# Altium schematic symbol library Grant_..SchLib: 158 symbols (part 4 of 4)
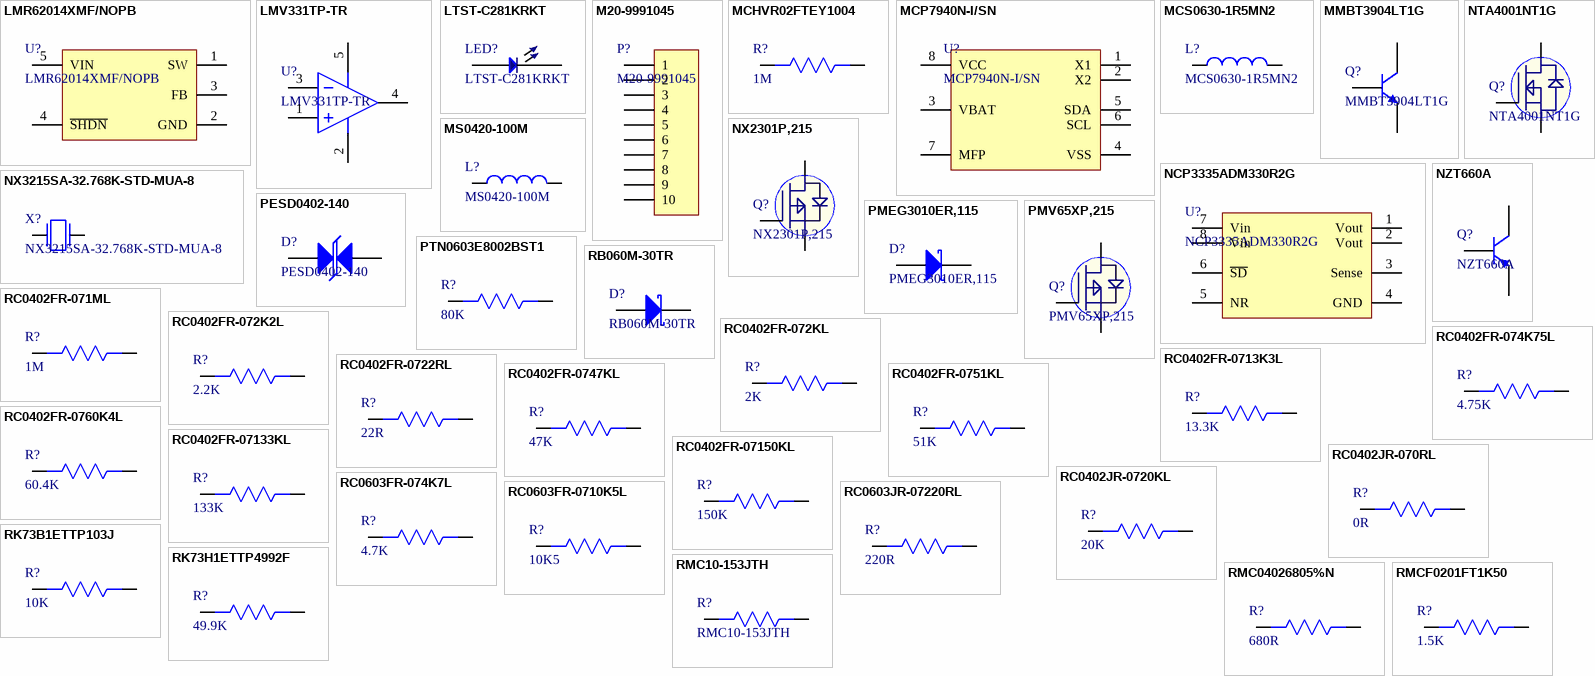
[diagram p7: symbols LMR62014XMF/NOPB to RMCF0201FT1K50]

## RC0603JR-07220RL
designator R?, comment 220R
RES SMD 0603 220 Ohm 5% 1/10W +/-100ppm/ßC Molded SMD Paper T/R; Manufacturer: Yageo; Manufacturer Part Number: RC0603JR-07220RL; Temperature Coefficient: 100ppm/°C; Voltage Rating: 50V; Power Rating: 100mW; Working Voltage: 75V; Supplier 1: Digi-Key; RoHS: Yes; Category: Chip SMD Resistors; Stock 1: 724747; Pricing 1: 1=0.10000, 10=0.02000, 100=0.00800, 1000=0.00360, 2500=0.00312 (USD); Case/Package: 0603; Number of Pins: 2; Case Code (Imperial): 0603; Case Code (Metric): 1608; Min Operating Temperature: -55°C; Max Operating Temperature: 155°C; Resistance: 220R; Tolerance: 5%; Resistor Type: Thick Film; Packaging: Tape and Reel; Voltage Rating (DC): 50V; Resistance Tolerance: 5%; Termination: SMD/SMT; Number of Terminations: 2; Features: Moisture Resistant; Series: RC; Max Power Dissipation: 100mW; Construction: Rectangular; Length: 1.6mm; Width: 0.8mm; Depth: 0.8mm; REACH SVHC: No SVHC; Lead Free: Lead Free; RoHS Compliant: Yes; Military Standard: Not; ComponentLink1URL: https://datasheet.ciiva.com/46394/443971-46394998.pdf?src-supplier=Element14; ComponentLink1Description: https://datasheet.ciiva.com/46394/443971-46394998.pdf?src-supplier=Element14; Supplier Part Number 1: 311-220GRCT-ND
footprint Res0603
pins: 1, 2

## RK73B1ETTP103J
designator R?, comment 10K
RES 10K OHM 5% 1/10W 0402; Manufacturer: KOA Speer; Manufacturer Part Number: RK73B1ETTP103J; Resistance: 10kR; Power Rating: 63mW; Voltage Rating: 50V; Temperature Coefficient: 200ppm/°C; Supplier 1: Digi-Key; Stock 1: 2917894; Pricing 1: 1=0.1, 10=0.016, 100=0.0065, 1000=0.00292, 2500=0.00253, 5000=0.00209 (USD); Mount: Surface Mount; Case/Package: 0402; Case Code (Imperial): 0402; Case Code (Metric): 1005; Min Operating Temperature: -55°C; Max Operating Temperature: 155°C; Packaging: Tape and Reel; Tolerance: 5%; Package Quantity: 10000; Composition: Thick Film; Termination: SMD/SMT; Military Standard: Not; Voltage Rating (DC): 50V; Length: 1mm; Height: 0.35mm; Width: 0.5mm; Depth: 0.5mm; Lead Free: Lead Free; ComponentLink1URL: https://www.verical.com/server-webapp/html/getDatasheet?partID=89073&src-supplier=Verical; ComponentLink1Description: https://www.verical.com/server-webapp/html/getDatasheet?partID=89073&src-supplier=Verical; Supplier Part Number 1: 2019-RK73B1ETTP103JCT-ND
footprint Res0402
pins: 1, 2

## RK73H1ETTP4992F
designator R?, comment 49.9K
RES 49.9K OHM 1% 1/10W 0402; Manufacturer: KOA Speer; Manufacturer Part Number: RK73H1ETTP4992F; Resistance: 49.9kR; Power Rating: 63mW; Voltage Rating: 50V; Temperature Coefficient: 100ppm/°C; Supplier 1: Digi-Key; Stock 1: 158829; Pricing 1: 1=0.1, 10=0.024, 100=0.0097, 1000=0.00437, 2500=0.0038, 5000=0.00314 (USD); Case/Package: 0402; Case Code (Imperial): 0402; Case Code (Metric): 1005; Min Operating Temperature: -55°C; Max Operating Temperature: 155°C; Tolerance: 1%; Packaging: Tape and Reel; Package Quantity: 10000; Composition: Thick Film; Termination: SMD/SMT; Working Voltage: 50V; Military Standard: Not; Voltage Rating (DC): 50V; Length: 1mm; Height: 0.35mm; Width: 0.5mm; Depth: 0.5mm; Lead Free: Lead Free; ComponentLink1URL: http://www.jameco.com/Jameco/Products/ProdDS/1883861.pdf?src-supplier=Jameco; ComponentLink1Description: http://www.jameco.com/Jameco/Products/ProdDS/1883861.pdf?src-supplier=Jameco; ComponentLink2URL: http://components.arrow.com/part/dataview/39721535S7077293N5146?src-supplier=Arrow; ComponentLink2Description: http://components.arrow.com/part/dataview/39721535S7077293N5146?src-supplier=Arrow; ComponentLink3URL: http://www.koaspeer.com/catimages/Products/RK73H/RK73H.pdf?src-supplier=Mouser; ComponentLink3Description: http://www.koaspeer.com/catimages/Products/RK73H/RK73H.pdf?src-supplier=Mouser; Supplier Part Number 1: 2019-RK73H1ETTP4992FCT-ND
footprint Res0402
pins: 1, 2

## RMC10-153JTH
designator R?
15K ±5% 1/10W ±200ppm/℃ 0402 Chip Resistor - Surface Mount RoHS; Manufacturer: KAMAYA; Manufacturer Part No: RMC10-153JTH; Package: 0402; Value: 15K
footprint Res0402
pins: 1, 2

## RMC04026805%N
designator R?, comment 680R
680 ±5% 1/16W 0402 Chip Resistor - Surface Mount RoHS; Manufacturer: TyoHM; Manufacturer Part No: RMC04026805%N; Package: 0402; Value: 680R
footprint Res0402
pins: 1, 2

## RMCF0201FT1K50
designator R?, comment 1.5K
RES SMD 1.5K OHM 1% 1/20W 0201; Manufacturer: Stackpole Electronics; Manufacturer Part Number: RMCF0201FT1K50; Resistance: 1.5kR; Max Power Dissipation: 50mW; Temperature Coefficient: 200ppm/°C; Supplier 1: Digi-Key; RoHS: Yes; Category: Chip SMD Resistors; Stock 1: 151457; Pricing 1: 1=0.10000, 10=0.02700, 100=0.01090, 1000=0.00488, 2500=0.00423, 5000=0.00350 (USD); Mount: Surface Mount; Case/Package: 0201; Case Code (Metric): 0603; Case Code (Imperial): 0201; Contact Plating: Tin,Matte; Min Operating Temperature: -55°C; Max Operating Temperature: 125°C; Packaging: Tape and Reel; Tolerance: 1%; Resistor Type: Thick Film; Number of Terminations: 2; Series: RMCF; Length: 0.024inch; Width: 0.012inch; Height: 0.009inch; Radiation Hardening: No; RoHS Compliant: Yes; ComponentLink1URL: https://www.seielect.com/Catalog/SEI-RMCF_RMCP.pdf?src-supplier=Digi-Key; ComponentLink1Description: https://www.seielect.com/Catalog/SEI-RMCF_RMCP.pdf?src-supplier=Digi-Key; ComponentLink2URL: https://www.seielect.com/catalog/SEI-Packaging.pdf?src-supplier=Digi-Key; ComponentLink2Description: https://www.seielect.com/catalog/SEI-Packaging.pdf?src-supplier=Digi-Key; ComponentLink3URL: https://www.seielect.com/catalog/SEI-RMCF_RMCP.pdf?src-supplier=Avnet; ComponentLink3Description: https://www.seielect.com/catalog/SEI-RMCF_RMCP.pdf?src-supplier=Avnet; Supplier Part Number 1: RMCF0201FT1K50CT-ND
footprint Res-0201
pins: 1, 2

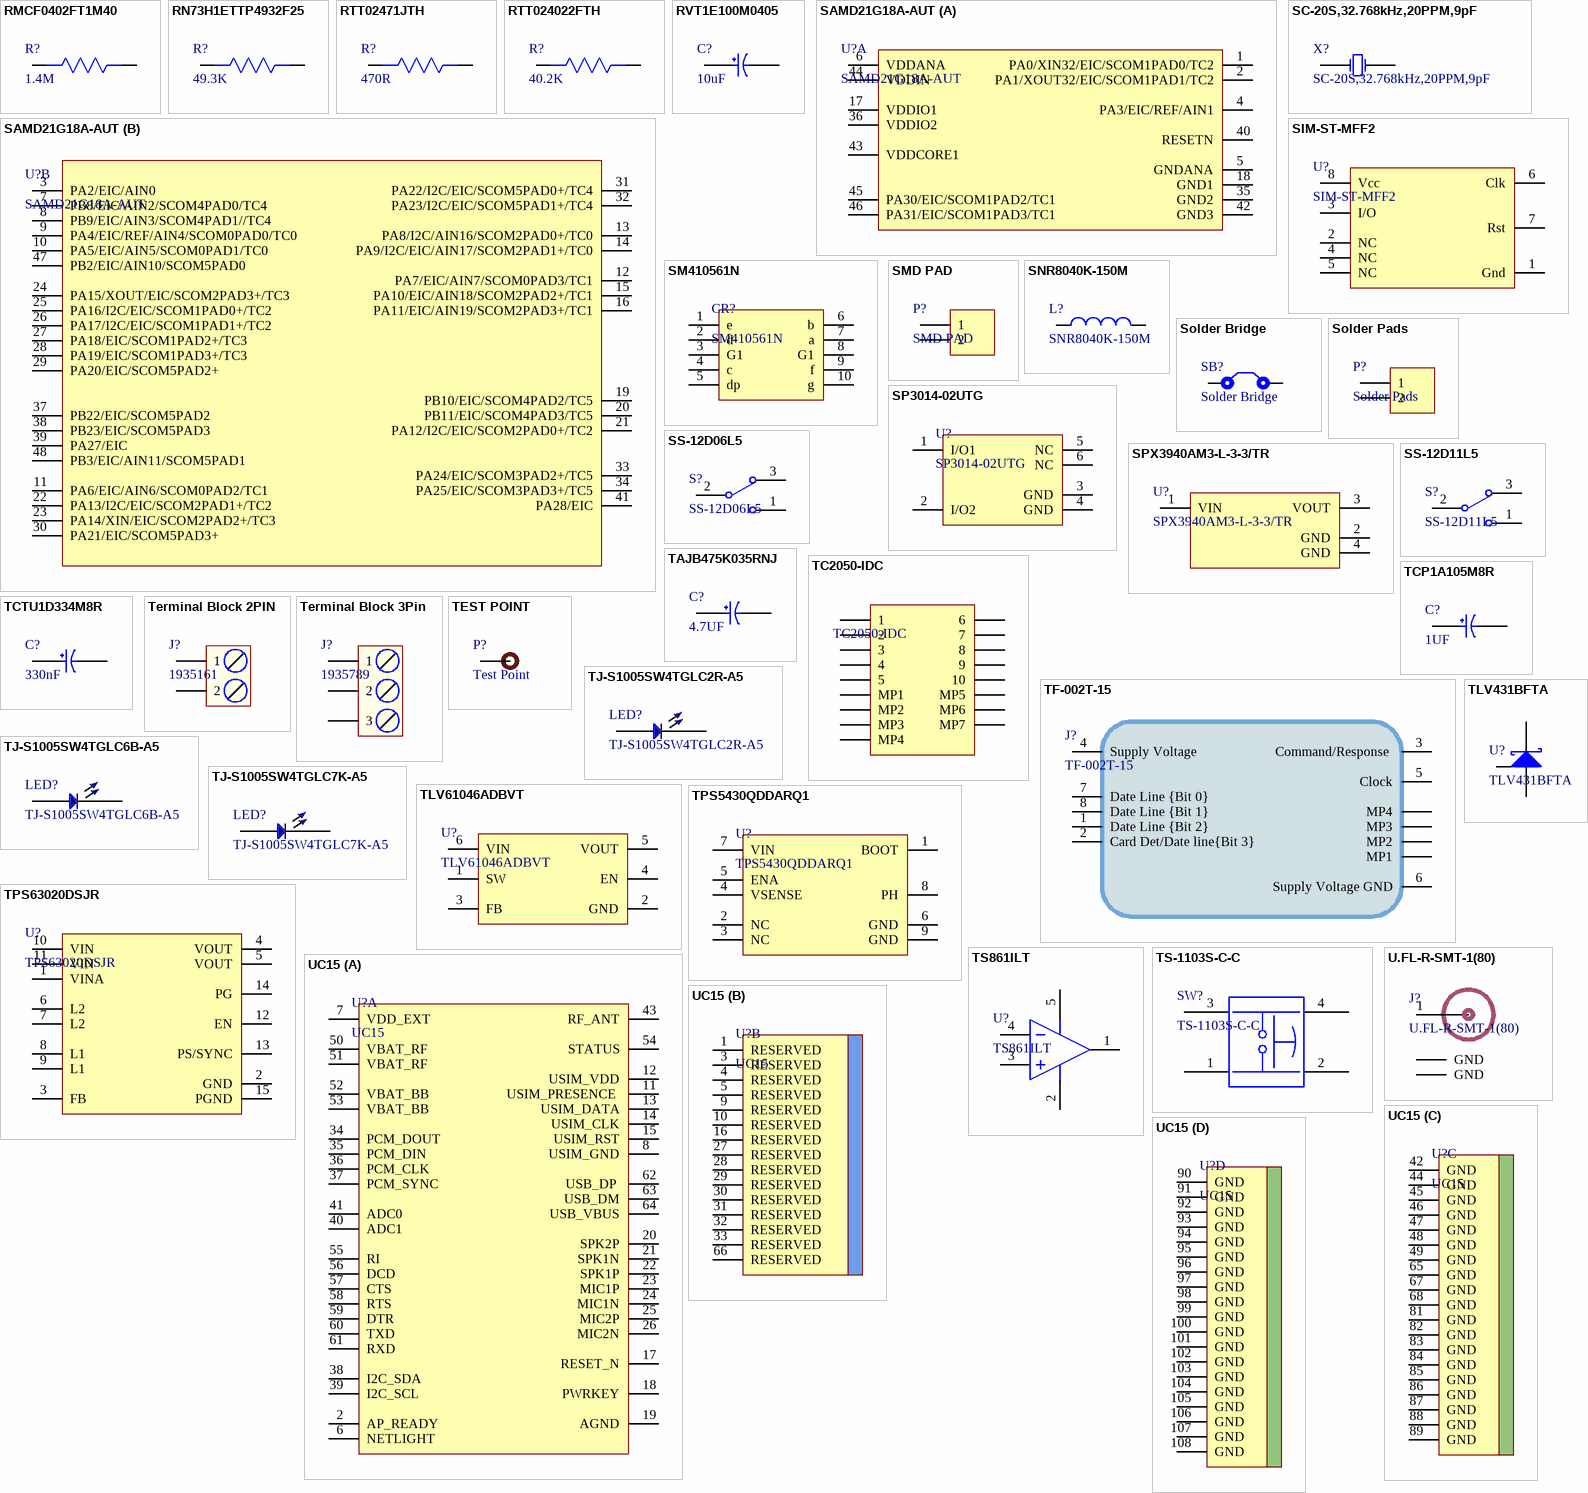
[diagram p3: symbols RMCF0402FT1M40 to UC15]

## RMCF0402FT1M40
designator R?, comment 1.4M
RES 1.4M OHM 1% 1/16W 0402; Manufacturer: Stackpole Electronics; Manufacturer Part Number: RMCF0402FT1M40; Resistance: 1.4MR; Max Power Dissipation: 63mW; Temperature Coefficient: 200ppm/°C; Supplier 1: Digi-Key; Stock 1: 14210; Pricing 1: 1=0.1, 10=0.019, 100=0.0078, 1000=0.0035, 2500=0.003, 5000=0.0025 (USD); Mount: Surface Mount; Case/Package: 0402; Contact Plating: Tin,Matte; Min Operating Temperature: -55°C; Max Operating Temperature: 155°C; Packaging: Tape and Reel; Tolerance: 1%; Composition: Thick Film; Package Quantity: 10000; Number of Terminations: 2; Features: Automotive AEC-Q200; Length: 0.039inch; Height: 0.016inch; Width: 0.02inch; Radiation Hardening: No; ComponentLink1URL: https://www.seielect.com/catalog/sei-rmcf_rmcp.pdf?src-supplier=Digi-Key; ComponentLink1Description: https://www.seielect.com/catalog/sei-rmcf_rmcp.pdf?src-supplier=Digi-Key; ComponentLink2URL: https://www.seielect.com/catalog/SEI-RMCF_RMCP.pdf?src-supplier=Avnet; ComponentLink2Description: https://www.seielect.com/catalog/SEI-RMCF_RMCP.pdf?src-supplier=Avnet; ComponentLink3URL: https://www.seielect.com/catalog/SEI-Packaging.pdf?src-supplier=Digi-Key; ComponentLink3Description: https://www.seielect.com/catalog/SEI-Packaging.pdf?src-supplier=Digi-Key; Supplier Part Number 1: RMCF0402FT1M40CT-ND
footprint Res0402
pins: 1, 2

## RN73H1ETTP4932F25
designator R?, comment 49.3K
RES 49.3K OHM 1% 1/16W 0402; Manufacturer: KOA Speer; Manufacturer Part Number: RN73H1ETTP4932F25; Voltage Rating: 50V; Resistance: 49.3kR; Power Rating: 63mW; Temperature Coefficient: 25ppm/°C; ComponentLink1URL: http://www.mouser.com/ds/2/219/RN73H-12200.pdf?src-supplier=Mouser; ComponentLink1Description: http://www.mouser.com/ds/2/219/RN73H-12200.pdf?src-supplier=Mouser; Supplier 1: Digi-Key; Stock 1: 39390; Pricing 1: 1=0.49, 10=0.372, 100=0.1563, 1000=0.0862, 2500=0.0809, 5000=0.0733 (USD); Case/Package: 0402; Case Code (Metric): 1005; Case Code (Imperial): 0402; Min Operating Temperature: -55°C; Max Operating Temperature: 155°C; Packaging: Tape and Reel; Tolerance: 1%; Termination: SMD/SMT; Voltage Rating (DC): 50V; Supplier Part Number 1: 2019-RN73H1ETTP4932F25CT-ND
footprint Res0402
pins: 1, 2

## RTT02471JTH
designator R?, comment 470R
470 ±5% 1/16W ±100ppm/°C 0402 Chip Resistor - Surface Mount RoHS; Manufacturer: RALEC; Manufacturer Part No: RTT02471JTH; Package: 0402; Value: 470R
footprint Res0402
pins: 1, 2

## RTT024022FTH
designator R?, comment 40.2K
40.2K ±1% 1/16W ±100ppm/°C 0402 Chip Resistor - Surface Mount RoHS; Manufacturer: RALEC; Manufacturer Part No: RTT024022FTH; Package: 0402; Value: 40.2K
footprint Res0402
pins: 1, 2

## RVT1E100M0405
designator C?, comment 10uF
CAP ALUM 10uF 25V SMD; Manufacturer: ROQANG; φD: 4mm; L: 5.4mm; Tolerance: ±20%; Operating Temperature: -45℃~+105℃; Rated Voltage: 25V; Capacitance: 10uF
footprint RVT1E100M0405 (10uF 25V 5.4mm SMD)
pins: 1, 2

## SAMD21G18A-AUT
designator U?
IC MCU 32BIT 256KB FLASH 48TQFP; Manufacturer: Microchip; Manufacturer Part Number: ATSAMD21G18A-AUT; Supplier 1: Digi-Key; Stock 1: 4547; Pricing 1: 1=3.32, 25=3.0104, 100=2.7348 (USD); ComponentLink1URL: http://www.microchip.com/mymicrochip/filehandler.aspx?ddocname=en590210; ComponentLink1Description: http://www.microchip.com/mymicrochip/filehandler.aspx?ddocname=en590210; Supplier Part Number 1: ATSAMD21G18A-AUTDKR-ND
footprint SAMD21G18A-AUT (IC MCU 32BIT 256KB FLASH 48TQFP)
part A pins: 1 PA0/XIN32/EIC/SCOM1PAD0/TC2, 2 PA1/XOUT32/EIC/SCOM1PAD1/TC2, 4 PA3/EIC/REF/AIN1, 5 GNDANA, 6 VDDANA, 17 VDDIO1, 18 GND1, 35 GND2, 36 VDDIO2, 40 RESETN, 42 GND3, 43 VDDCORE1, 44 VDDIN, 45 PA30/EIC/SCOM1PAD2/TC1, 46 PA31/EIC/SCOM1PAD3/TC1
part B pins: 3 PA2/EIC/AIN0, 7 PB8/EIC/AIN2/SCOM4PAD0/TC4, 8 PB9/EIC/AIN3/SCOM4PAD1//TC4, 9 PA4/EIC/REF/AIN4/SCOM0PAD0/TC0, 10 PA5/EIC/AIN5/SCOM0PAD1/TC0, 11 PA6/EIC/AIN6/SCOM0PAD2/TC1, 12 PA7/EIC/AIN7/SCOM0PAD3/TC1, 13 PA8/I2C/AIN16/SCOM2PAD0+/TC0, 14 PA9/I2C/EIC/AIN17/SCOM2PAD1+/TC0, 15 PA10/EIC/AIN18/SCOM2PAD2+/TC1, 16 PA11/EIC/AIN19/SCOM2PAD3+/TC1, 19 PB10/EIC/SCOM4PAD2/TC5, 20 PB11/EIC/SCOM4PAD3/TC5, 21 PA12/I2C/EIC/SCOM2PAD0+/TC2, 22 PA13/I2C/EIC/SCOM2PAD1+/TC2, 23 PA14/XIN/EIC/SCOM2PAD2+/TC3, 24 PA15/XOUT/EIC/SCOM2PAD3+/TC3, 25 PA16/I2C/EIC/SCOM1PAD0+/TC2, 26 PA17/I2C/EIC/SCOM1PAD1+/TC2, 27 PA18/EIC/SCOM1PAD2+/TC3, 28 PA19/EIC/SCOM1PAD3+/TC3, 29 PA20/EIC/SCOM5PAD2+, 30 PA21/EIC/SCOM5PAD3+, 31 PA22/I2C/EIC/SCOM5PAD0+/TC4, 32 PA23/I2C/EIC/SCOM5PAD1+/TC4, 33 PA24/EIC/SCOM3PAD2+/TC5, 34 PA25/EIC/SCOM3PAD3+/TC5, 37 PB22/EIC/SCOM5PAD2, 38 PB23/EIC/SCOM5PAD3, 39 PA27/EIC, 41 PA28/EIC, 47 PB2/EIC/AIN10/SCOM5PAD0, 48 PB3/EIC/AIN11/SCOM5PAD1

## SC-20S,32.768kHz,20PPM,9pF
designator X?
32.768KHz ±20ppm 9pF 90kΩ SMD-2012_2P SMD Crystal Resonators RoHS; Manufacturer: Seiko; Pakage: Custom; Manufacturer Part No: SC-20S,32.768kHz,20PPM,9pF; Value: 32.768KHz
footprint SC-20S,32.768kHz,20PPM,9pF
pins: 1 OSC1, 2 OSC2

## SIM-ST-MFF2
designator U?
GLOBAL IOT EMBEDDED SIM CHIP; Manufacturer: Hologram; Supplier 1: Digi-Key; Manufacturer Part Number: SIM-ST-MFF2; Stock 1: 0; Pricing 1: 1=6.3, 100=5.985 (USD); ComponentLink1URL: https://media.digikey.com/pdf/Data%20Sheets/Hologram%20PDFs/SIM_DS_170107_v2.pdf?src-supplier=Digi-Key; ComponentLink1Description: https://media.digikey.com/pdf/Data%20Sheets/Hologram%20PDFs/SIM_DS_170107_v2.pdf?src-supplier=Digi-Key; Supplier Part Number 1: 1887-1002-1-ND
footprint SIM-ST-MFF2
pins: 1 Gnd, 2 NC, 3 I/O, 4 NC, 5 NC, 6 Clk, 7 Rst, 8 Vcc

## SM410561N
designator CR?
Red 633nm 1 Anode(Positiveelectrode) 0.56''(14.22mm) Plugin Led Segment Display ROHS; Manufacturer: ARKLED; Manufacturer Part No: SM410561N; Package: Custom
footprint SM410561N
pins: 1 e, 2 d, 3 G1, 4 c, 5 dp, 6 b, 7 a, 8 G1, 9 f, 10 g

## SMD PAD
designator P?
Wire Connecting Pad
footprint SMD PAD
pins: 1, 2

## SNR8040K-150M
designator L?
15uH ±20% 2.5A 56mΩ SMD,8.0x8.0mm Inductors (SMD) RoHS; Manufacturer: 3L COILS; Manufacturer Part No: SNR8040K-150M; Package: Custom; Value: 15uH
footprint SNR8040K-150M
pins: 1, 2

## Solder Bridge
designator SB?
Solder Bridge ON
footprint Solder Bridge (Solder Bridge ON)
pins: 1, 2

## Solder Pads
designator P?
TH-2.54mm
footprint Solder Pads (SMD-0402)
pins: 1, 2

## SP3014-02UTG
designator U?
TVS DIODE 5V 6.8V 6UDFN; Manufacturer: Littelfuse; Capacitance: 1E-12F; Number of Bidirectional Channels: 2; Power Line Protection: Yes; Polarity: Unidirectional; Max Surge Current: 8A; Supplier 1: Digi-Key; Manufacturer Part Number: SP3014-02UTG; Stock 1: 3888; Pricing 1: 1=0.56, 10=0.495, 25=0.4652, 100=0.3375, 250=0.32552, 500=0.282, 1000=0.24 (USD); Mount: Surface Mount; Number of Pins: 6; Min Operating Temperature: -40°C; Max Operating Temperature: 125°C; Packaging: Tape and Reel; Reverse Standoff Voltage: 5V; Clamping Voltage: 6.8V; Termination: SMD/SMT; Number of Channels: 2; Working Voltage: 5V; Package Quantity: 3000; Peak Pulse Current: 8A; Length: 1.65mm; Height: 0.55mm; Width: 1.05mm; ComponentLink1URL: http://www.mouser.com/ds/2/240/Littelfuse_TVS_Diode_Array_SP3014_Datasheet.pdf-364113.pdf?src-supplier=Mouser; ComponentLink1Description: http://www.mouser.com/ds/2/240/Littelfuse_TVS_Diode_Array_SP3014_Datasheet.pdf-364113.pdf?src-supplier=Mouser; ComponentLink2URL: https://www.littelfuse.com/~/media/electronics/datasheets/tvs_diode_arrays/littelfuse_tvs_diode_array_sp3014_datasheet.pdf.pdf?src-supplier=Digi-Key; ComponentLink2Description: https://www.littelfuse.com/~/media/electronics/datasheets/tvs_diode_arrays/littelfuse_tvs_diode_array_sp3014_datasheet.pdf.pdf?src-supplier=Digi-Key; ComponentLink3URL: http://www.littelfuse.com/~/media/electronics/datasheets/tvs_diode_arrays/littelfuse_tvs_diode_array_sp3014_datasheet.pdf.pdf?src-supplier=Digi-Key; ComponentLink3Description: http://www.littelfuse.com/~/media/electronics/datasheets/tvs_diode_arrays/littelfuse_tvs_diode_array_sp3014_datasheet.pdf.pdf?src-supplier=Digi-Key; ComponentLink4URL: http://www.farnell.com/datasheets/2291833.pdf?src-supplier=Element14; ComponentLink4Description: http://www.farnell.com/datasheets/2291833.pdf?src-supplier=Element14; ComponentLink5URL: http://www.farnell.com/datasheets/2291833.pdf?src-supplier=Farnell; ComponentLink5Description: http://www.farnell.com/datasheets/2291833.pdf?src-supplier=Farnell; ComponentLink6URL: http://www.farnell.com/datasheets/2291833.pdf?src-supplier=Newark; ComponentLink6Description: http://www.farnell.com/datasheets/2291833.pdf?src-supplier=Newark; Supplier Part Number 1: F6501DKR-ND
footprint SP3014-02UTG
pins: 1 I/O1, 2 I/O2, 3 GND, 4 GND, 5 NC, 6 NC

## SPX3940AM3-L-3-3/TR
designator U?
IC REG LDO 3.3V 1A SOT223; Manufacturer: Exar; Max Input Voltage: 16V; Dropout Voltage: 280mV; Number of Outputs: 1; Min Input Voltage: 3.1V; Polarity: Positive; Quiescent Current: 25mA; Output Voltage Accuracy: 1%; Supplier 1: Mouser; Manufacturer Part Number: SPX3940AM3-L-3-3/TR; RoHS: Yes; Category: Voltage Regulators - Linear; Mount: Surface Mount; Case/Package: SOT-223; Number of Pins: 4; Min Operating Temperature: -40°C; Max Operating Temperature: 125°C; Packaging: Tape and Reel; Output Current: 1A; Max Output Current: 1A; Output Voltage: 3.3V; Min Output Voltage: 3.3V; RoHS Compliant: Yes; Lead Free: Lead Free; ComponentLink1URL: https://datasheet.ciiva.com/2057/spx3940-ds-r100-022912-2057339.pdf?src-supplier=Digi-Key; ComponentLink1Description: https://datasheet.ciiva.com/2057/spx3940-ds-r100-022912-2057339.pdf?src-supplier=Digi-Key; ComponentLink2URL: https://datasheet.ciiva.com/16386/spx3940-series-16386634.pdf?src-supplier=Future+Electronics; ComponentLink2Description: https://datasheet.ciiva.com/16386/spx3940-series-16386634.pdf?src-supplier=Future+Electronics; Supplier Part Number 1: 701-SPX3940AM3-L33TR
footprint SPX3940AM3-L-3-3/TR (IC REG LINEAR 3.3V 1A SOT223)
pins: 1 VIN, 2 GND, 3 VOUT, 4 GND

## SS-12D06L5
designator S?
SPDT 3A 250V On-On DIP Toggle Switches RoHS; Manufacturer: XKB Enterprise; Value: Custom; Manufacturer Part No: SS-12D06L5; Package: Custom
footprint SS-12D06L5
pins: 1, 2, 3

## SS-12D11L5
designator S?
SPDT 5A 120V On-On DIP Toggle Switches RoHS; Manufacturer: XKB Enterprise; Value: Custom; Manufacturer Part No: SS-12D11L5; Package: Custom
footprint SS-12D11L5
pins: 1, 2, 3

## TAJB475K035RNJ
designator C?, comment 4.7UF
CAP TANT 4.7UF 10% 35V 1411; Manufacturer: Kyocera AVX; Manufacturer Part Number: TAJB475K035RNJ; Dielectric Material: Tantalum; Tolerance: 20%; ESR (Equivalent Series Resistance): 3.1R; Leakage Current: 1.6uA; Polarity: Polar; Dissipation Factor: 6%; Supplier 1: Digi-Key; Stock 1: 3949; Pricing 1: 1=0.71, 10=0.505, 100=0.3322, 500=0.2461, 1000=0.20919 (USD); Mount: Surface Mount,PCB; Case/Package: 1210; Number of Pins: 2; Weight: 0.000564oz; Case Code (Imperial): 1210; Case Code (Metric): 3528; Min Operating Temperature: -55°C; Max Operating Temperature: 125°C; Capacitance: 4.7uF; Voltage Rating: 35V; Packaging: Tape and Reel; Package Quantity: 1; Voltage Rating (DC): 35V; Termination: SMD/SMT; Voltage: 35V; Features: General Purpose; Length: 3.5mm; Height: 1.9mm; Depth: 2.8mm; Width: 2.8mm; Height - Seated (Max): 0.083inch; Radiation Hardening: No; REACH SVHC: No SVHC; Lead Free: Lead Free; ComponentLink1URL: http://uk.rs-online.com/webdocs/0ccd/0900766b80ccdc61.pdf?src-supplier=RSComponents; ComponentLink1Description: http://uk.rs-online.com/webdocs/0ccd/0900766b80ccdc61.pdf?src-supplier=RSComponents; ComponentLink2URL: http://www.farnell.com/datasheets/1826076.pdf?src-supplier=Element14; ComponentLink2Description: http://www.farnell.com/datasheets/1826076.pdf?src-supplier=Element14; ComponentLink3URL: http://datasheets.avx.com/TAJ.pdf?src-supplier=Digi-Key; ComponentLink3Description: http://datasheets.avx.com/TAJ.pdf?src-supplier=Digi-Key; ComponentLink4URL: http://www.avx.com/docs/Catalogs/taj.pdf?src-supplier=Farnell; ComponentLink4Description: http://www.avx.com/docs/Catalogs/taj.pdf?src-supplier=Farnell; ComponentLink5URL: https://www.alliedelec.com/m/d/9166fb755e7ffffad4c533f86d810ce4.pdf?src-supplier=Allied+Electronics; ComponentLink5Description: https://www.alliedelec.com/m/d/9166fb755e7ffffad4c533f86d810ce4.pdf?src-supplier=Allied+Electronics; ComponentLink6URL: https://www.distrelec.biz/Web/Downloads/_e/ng/taj_ENG.pdf?mime=application%2Fpdf&src-supplier=Distrelec; ComponentLink6Description: https://www.distrelec.biz/Web/Downloads/_e/ng/taj_ENG.pdf?mime=application%2Fpdf&src-supplier=Distrelec; ComponentLink7URL: http://www.avx.com/docs/catalogs/taj.pdf?src-supplier=Avnet+Europe; ComponentLink7Description: http://www.avx.com/docs/catalogs/taj.pdf?src-supplier=Avnet+Europe; ComponentLink8URL: http://www.avx.com/docs/catalogs/taj.pdf?src-supplier=Avnet; ComponentLink8Description: http://www.avx.com/docs/catalogs/taj.pdf?src-supplier=Avnet; ComponentLink9URL: http://www.avxcorp.com/docs/Catalogs/taj.pdf?src-supplier=Future+Electronics; ComponentLink9Description: http://www.avxcorp.com/docs/Catalogs/taj.pdf?src-supplier=Future+Electronics; ComponentLink10URL: http://www.mouser.com/ds/2/40/taj-776811.pdf?src-supplier=Mouser; ComponentLink10Description: http://www.mouser.com/ds/2/40/taj-776811.pdf?src-supplier=Mouser; ComponentLink11URL: https://www.verical.com/server-webapp/html/getDatasheet?partID=149140&src-supplier=Verical; ComponentLink11Description: https://www.verical.com/server-webapp/html/getDatasheet?partID=149140&src-supplier=Verical; Supplier Part Number 1: 478-1691-1-ND
footprint TAJB475K035RNJ
pins: 1, 2

## TC2050-IDC
designator ?
CBL PLUG-OF-NAILS 10-PIN W/LEGS; Manufacturer: Tag-Connect; Supplier 1: Digi-Key; Manufacturer Part Number: TC2050-IDC; Stock 1: 59; Pricing 1: 1=40.17 (USD); Package Quantity: 1; ComponentLink1URL: http://www.tag-connect.com/Materials/TC2050-IDC%20Datasheet.pdf?src-supplier=Digi-Key; ComponentLink1Description: http://www.tag-connect.com/Materials/TC2050-IDC%20Datasheet.pdf?src-supplier=Digi-Key; Supplier Part Number 1: TC2050-IDC-ND
footprint TC2050-IDC (CBL PLUG-OF-NAILS 10-PIN W/LEGS)
pins: 1, 2, 3, 4, 5, 6, 7, 8, 9, 10, MP1, MP2, MP3, MP4, MP5, MP6, MP7

## TCP1A105M8R
designator C?, comment 1UF
1uF 10V ±20% 0805 Tantalum Capacitors ROHS; Manufacturer: ROHM; Manufacturer Part No: TCP1A105M8R; Package: 0805; Value: 1uF; ComponentLink1Description: LCSC; ComponentLink1URL: https://lcsc.com/product-detail/Tantalum-Capacitors_ROHM-Semicon-TCP1A105M8R_C1952948.html
footprint TCP1A105M8R
pins: 1, 2

## TCTU1D334M8R
designator C?, comment 330nF
CAP TANT 0.33 uF 20 V ±20% 0402; Manufacturer: Rohm; Manufacturer Part Number: TCTU1D334M8R; Voltage Rating: 20V; Leakage Current: 700nA; Supplier 1: Digi-Key; RoHS: Yes; Category: Tantalum Capacitors; Stock 1: 28079; Pricing 1: 1=0.52000, 10=0.36800, 50=0.27800, 100=0.24220, 500=0.17940, 1000=0.15249, 2500=0.14352, 5000=0.13455 (USD); Mount: Surface Mount; Case/Package: 0402; Case Code (Metric): 1005; Case Code (Imperial): 0402; Min Operating Temperature: -55°C; Max Operating Temperature: 125°C; Package Quantity: 10000; Packaging: Tape and Reel; Capacitance: 330nF; Tolerance: 20%; Termination: SMD/SMT; Dissipation Factor: 20%; Voltage Rating (DC): 20V; Features: General Purpose; Length: 0.039inch; Width: 0.5mm; Height: 0.6mm; Height - Seated (Max): 0.024inch; Lead Free: Lead Free; RoHS Compliant: Yes; ComponentLink1URL: https://datasheet.ciiva.com/29503/tct-u-29503913.pdf?src-supplier=Digi-Key; ComponentLink1Description: https://datasheet.ciiva.com/29503/tct-u-29503913.pdf?src-supplier=Digi-Key; ComponentLink2URL: https://datasheet.ciiva.com/29503/tct-u-29503914.pdf?src-supplier=Digi-Key; ComponentLink2Description: https://datasheet.ciiva.com/29503/tct-u-29503914.pdf?src-supplier=Digi-Key; ComponentLink3URL: https://datasheet.ciiva.com/29503/tct-u-29503915.pdf?src-supplier=Digi-Key; ComponentLink3Description: https://datasheet.ciiva.com/29503/tct-u-29503915.pdf?src-supplier=Digi-Key; Supplier Part Number 1: 511-1684-1-ND
footprint TCTU1D334M8R
pins: 1, 2

## Terminal Block 2PIN
designator J?, comment 1935161
TERM BLK 2POS SIDE ENTRY 5MM PCB; Manufacturer: Phoenix Contact; Max Current Rating: 16A; Max Supply Voltage: 250V; Current Rating: 17.5A; Number of Poles: 2; Number of Levels: 1; Current: 18A; Voltage: 300V; Voltage Rating (DC): 320V; Connector Type: Screw; Wire Gauge (Max): 26AWG; Wire Gauge (Min): 12AWG; Approvals: UL; Supplier 1: Digi-Key; Manufacturer Part Number: 1935161; Stock 1: 30684; Pricing 1: 1=0.43, 10=0.411, 50=0.3928, 100=0.382, 250=0.357, 500=0.32844, 1000=0.3035 (USD); Mount: Through Hole; Number of Pins: 2; Weight: 0.067021oz; Color: Green; Material: Nylon; Housing Color: Green; Housing Material: Polyamide; Insulation Material: Nylon; Contact Material: Copper,Tin; Number of Rows: 1; Voltage Rating: 250V; Package Quantity: 250; Packaging: Bulk; Number of Positions: 2; Number of Positions Per Level: 2; Termination: Solder; Number of Contacts: 2; Number of Circuits: 2; Orientation: Straight; Length: 9mm; Height: 11.3mm; Width: 14.9mm; Pitch: 5mm; Depth: 9mm; Wire/Cable Gauge: 26AWG; Radiation Hardening: No; Lead Free: Lead Free; Flammability Rating: UL94 V-0; REACH SVHC: Unknown; ComponentLink1URL: https://media.digikey.com/pdf/Data%20Sheets/Phoenix%20Contact%20PDFs/1935161.pdf?src-supplier=Digi-Key; ComponentLink1Description: https://media.digikey.com/pdf/Data%20Sheets/Phoenix%20Contact%20PDFs/1935161.pdf?src-supplier=Digi-Key; ComponentLink2URL: https://www.verical.com/server-webapp/html/getDatasheet?partID=177903&src-supplier=Verical; ComponentLink2Description: https://www.verical.com/server-webapp/html/getDatasheet?partID=177903&src-supplier=Verical; Supplier Part Number 1: 277-1667-ND
footprint Terminal Block 2PIN
pins: 1, 2

## Terminal Block 3Pin
designator J?, comment 1935789
TERM BLK 3POS SIDE ENTRY 5MM PCB; Manufacturer: Phoenix Contact; Number of Contacts: 3; Max Current Rating: 32A; Voltage Rating: 250V; Max Supply Voltage: 400V; Number of Levels: 1; Current: 20A; Voltage: 300V; Wire Gauge (Max): 20AWG; Wire Gauge (Min): 12AWG; Wire/Cable Gauge: 10AWG; Approvals: UL,VDE,CB; Supplier 1: Digi-Key; Manufacturer Part Number: 1935789; Stock 1: 1410; Pricing 1: 1=0.77, 10=0.737, 50=0.7046, 100=0.6853, 250=0.64052, 500=0.58926, 1000=0.54442, 2500=0.54438 (USD); Mount: Through Hole; Number of Pins: 3; Weight: 0.126986oz; Color: Green; Material: Nylon; Housing Color: Green; Housing Material: Polyamide; Contact Material: Tin; Packaging: Bulk; Termination: Solder; Package Quantity: 250; Number of Poles: 3; Current Rating: 32A; Number of Rows: 1; Number of Positions Per Level: 3; Number of Positions: 3; Number of Circuits: 3; Orientation: Straight; Length: 9mm; Height: 13.5mm; Width: 17.6mm; Pitch: 5mm; Depth: 9mm; Lead Free: Lead Free; Flammability Rating: UL94 V-0; ComponentLink1URL: https://media.digikey.com/pdf/Data%20Sheets/Phoenix%20Contact%20PDFs/PT-2-5-3-5-0-H_Dwg.pdf?src-supplier=Digi-Key; ComponentLink1Description: https://media.digikey.com/pdf/Data%20Sheets/Phoenix%20Contact%20PDFs/PT-2-5-3-5-0-H_Dwg.pdf?src-supplier=Digi-Key; ComponentLink2URL: http://components.arrow.com/part/dataview/43946399S9087780N1555?src-supplier=Arrow; ComponentLink2Description: http://components.arrow.com/part/dataview/43946399S9087780N1555?src-supplier=Arrow; ComponentLink3URL: https://produktinfo.conrad.com/datenblaetter/550000-574999/566910-da-01-en-PRINTKLEMME_1935789_250_ST.pdf?src-supplier=Conrad; ComponentLink3Description: https://produktinfo.conrad.com/datenblaetter/550000-574999/566910-da-01-en-PRINTKLEMME_1935789_250_ST.pdf?src-supplier=Conrad; Supplier Part Number 1: 277-6072-ND
footprint Terminal Block 3Pin
pins: 1, 2, 3

## TEST POINT
designator P?, comment Test Point
Test Point ON
footprint TEST POINT
pins: 1

## TF-002T-15
designator J?
SD Card Connector SMD; Manufacturer: SOFNG; Card Type: MicroSD; Card Connection Mode: Pluggable; ComponentLink1Description: LCSC; ComponentLink1URL: https://lcsc.com/product-detail/SD-Card-Connectors_SOFNG-TF-002T-15_C125616.html
footprint TF-002T-15 (SMD SD Card Connectors ROHS)
footprint TF-002T-15 (SMD SD Card Connectors ROHS)
pins: 1 Date Line {Bit 2}, 2 Card Det/Date line{Bit 3}, 3 Command/Response , 4 Supply Voltage (power), 5 Clock, 6 Supply Voltage GND (power), 7 Date Line {Bit 0}, 8 Date Line {Bit 1}, MP1, MP2, MP3, MP4

## TJ-S1005SW4TGLC2R-A5
designator LED?
Red 625nm 0402 Light Emitting Diodes (LED) RoHS; Manufacturer: TOGIALED; Manufacturer Part No: TJ-S1005SW4TGLC2R-A5; Package: 0402
footprint LED 0402
pins: 1, 2

## TJ-S1005SW4TGLC6B-A5
designator LED?
Blue 465nm 0402 Light Emitting Diodes (LED) RoHS; Manufacturer: TOGIALED; Value: Custom; Manufacturer Part No: TJ-S1005SW4TGLC6B-A5; Package: 0402
footprint LED 0402
pins: 1, 2

## TJ-S1005SW4TGLC7K-A5
designator LED?
Green 573nm 0402 Light Emitting Diodes (LED) RoHS; Manufacturer: TOGIALED; Value: Custom; Manufacturer Part No: TJ-S1005SW4TGLC7K-A5; Package: 0402
footprint LED 0402
pins: 1, 2

## TLV431BFTA
designator U?
IC VREF SHUNT 18V 0.5% SOT23; Manufacturer: Diodes Zetex; Max Input Voltage: 20V; Max Output Current: 15mA; Reference Type: Shunt,Adjustable; Min Output Voltage: 1.24V; Cathode Current: 100uA; Output Type: Adjustable; Supplier 1: Digi-Key; Manufacturer Part Number: TLV431BFTA; Stock 1: 51651; Pricing 1: 1=0.49, 10=0.417, 25=0.3888, 100=0.2889, 250=0.24444, 500=0.23332, 1000=0.17221 (USD); Mount: Surface Mount; Case/Package: SOT-23; Number of Pins: 3; Min Operating Temperature: -40°C; Max Operating Temperature: 125°C; Output Voltage: 18V; Packaging: Tape and Reel; Package Quantity: 1; Tolerance: 0.5%; Max Output Voltage: 18V; Output Current: 15mA; Reference Voltage: 18V; Length: 3.04mm; Height: 1.02mm; Width: 1.4mm; Radiation Hardening: No; REACH SVHC: No SVHC; Lead Free: Lead Free; ComponentLink1URL: https://www.diodes.com/assets/Datasheets/TLV431.pdf?src-supplier=Digi-Key; ComponentLink1Description: https://www.diodes.com/assets/Datasheets/TLV431.pdf?src-supplier=Digi-Key; ComponentLink2URL: http://www.farnell.com/datasheets/1904413.pdf?src-supplier=Element14; ComponentLink2Description: http://www.farnell.com/datasheets/1904413.pdf?src-supplier=Element14; ComponentLink3URL: http://www.farnell.com/datasheets/2100168.pdf?src-supplier=Element14; ComponentLink3Description: http://www.farnell.com/datasheets/2100168.pdf?src-supplier=Element14; ComponentLink4URL: http://www.diodes.com/datasheets/TLV431.pdf?src-supplier=Future+Electronics; ComponentLink4Description: http://www.diodes.com/datasheets/TLV431.pdf?src-supplier=Future+Electronics; Supplier Part Number 1: TLV431BFCT-ND
footprint SOT23-3 (SOT23, 3-Leads, Body 2.9x1.3mm, Pitch 0.95mm, Lead Span 2.3mm - Reverse Pinning, IPC High Density)
pins: 1 REF, 2 CATHODE, 3 ANODE

## TLV61046ADBVT
designator U?
IC REG BOOST ADJ SOT23-6; Manufacturer: Texas Instruments; Output Type: Adjustable; Output Configuration: Positive; Number of Outputs: 1; Min Input Voltage: 1.8V; Max Input Voltage: 5.5V; Min Output Voltage: 3.3V; Max Output Voltage: 28V; Switching Frequency: 1.05MHz; Supplier 1: Digi-Key; Manufacturer Part Number: TLV61046ADBVT; Stock 1: 7662; Pricing 1: 1=1.17, 10=1.047, 25=0.994, 100=0.7633 (USD); Mount: Surface Mount; Case/Package: SOT-23-6; Min Operating Temperature: -40°C; Max Operating Temperature: 125°C; Topology: Boost; Packaging: Tape and Reel; ComponentLink1URL: http://www.ti.com/lit/ds/symlink/tlv61046a.pdf?src-supplier=Digi-Key; ComponentLink1Description: http://www.ti.com/lit/ds/symlink/tlv61046a.pdf?src-supplier=Digi-Key; ComponentLink2URL: http://www.ti.com/lit/ds/slvsd82a/slvsd82a.pdf?src-supplier=Farnell; ComponentLink2Description: http://www.ti.com/lit/ds/slvsd82a/slvsd82a.pdf?src-supplier=Farnell; Supplier Part Number 1: 296-46927-1-ND
footprint TLV61048DBVT
pins: 1 SW, 2 GND, 3 FB, 4 EN, 5 VOUT, 6 VIN

## TPS5430QDDARQ1
designator U?
IC REG BUCK ADJUSTABLE 3A 8SOPWR; Manufacturer: Texas Instruments; Efficiency: 95%; Number of Outputs: 1; Output Voltage: 31V; Min Input Voltage: 5.5V; Max Input Voltage: 36V; Switching Frequency: 500kHz; Synchronous Rectifier: No; Min Output Voltage: 1.22V; Quiescent Current: 3mA; Supplier 1: Digi-Key; Manufacturer Part Number: TPS5430QDDARQ1; Stock 1: 2547; Pricing 1: 1=4.81, 10=4.32, 25=4.0836, 100=3.3578, 250=3.01292, 500=2.904, 1000=2.41395 (USD); Mount: Surface Mount; Number of Pins: 8; Weight: 0.00249oz; Min Operating Temperature: -40°C; Max Operating Temperature: 125°C; Output Current: 3A; Packaging: Tape and Reel; Max Output Current: 3A; Package Quantity: 2500; Max Output Voltage: 31V; Operating Supply Voltage: 36V; Output Type: Adjustable; Radiation Hardening: No; REACH SVHC: No SVHC; Lead Free: Lead Free; ComponentLink1URL: http://www.ti.com/general/docs/lit/getliterature.tsp?genericPartNumber=TPS5430-Q1&&fileType=pdf&src-supplier=Avnet; ComponentLink1Description: http://www.ti.com/general/docs/lit/getliterature.tsp?genericPartNumber=TPS5430-Q1&&fileType=pdf&src-supplier=Avnet; ComponentLink2URL: http://focus.ti.com/lit/ds/symlink/tps5430-q1.pdf?src-supplier=Avnet+Europe; ComponentLink2Description: http://focus.ti.com/lit/ds/symlink/tps5430-q1.pdf?src-supplier=Avnet+Europe; ComponentLink3URL: http://www.ti.com/lit/ds/symlink/tps5430-q1.pdf?src-supplier=Digi-Key; ComponentLink3Description: http://www.ti.com/lit/ds/symlink/tps5430-q1.pdf?src-supplier=Digi-Key; ComponentLink4URL: http://www.farnell.com/datasheets/2019094.pdf?src-supplier=Element14; ComponentLink4Description: http://www.farnell.com/datasheets/2019094.pdf?src-supplier=Element14; ComponentLink5URL: http://www.ti.com/lit/gpn/tps5430-q1?src-supplier=Mouser; ComponentLink5Description: http://www.ti.com/lit/gpn/tps5430-q1?src-supplier=Mouser; ComponentLink6URL: http://datasheet.iiic.cc/texas_instruments/TPS5430QDDARQ1.pdf?src-supplier=IIIC; ComponentLink6Description: http://datasheet.iiic.cc/texas_instruments/TPS5430QDDARQ1.pdf?src-supplier=IIIC; Supplier Part Number 1: 296-23177-1-ND
footprint TPS5430QDDARQ1
pins: 1 BOOT, 2 NC, 3 NC, 4 VSENSE, 5 ENA, 6 GND, 7 VIN, 8 PH, 9 GND

## TPS63020DSJR
designator U?
IC REG BCK BST ADJ 3.5A 14VSON; Manufacturer: Texas Instruments; Nominal Supply Current: 50uA; Min Supply Voltage: 1.8V; Number of Outputs: 1; Output Voltage: 5.5V; Output Current: 3A; Efficiency: 96%; Switching Frequency: 2.4MHz; Min Output Voltage: 1.2V; Synchronous Rectifier: Yes; Topology: Buck-Boost; Output Type: Adjustable; Output Configuration: Positive; Supplier 1: Digi-Key; Manufacturer Part Number: TPS63020DSJR; Stock 1: 64117; Pricing 1: 1=2.86, 10=2.565, 25=2.42, 100=1.936, 250=1.694, 500=1.6456, 1000=1.3068 (USD); Mount: Surface Mount; Number of Pins: 14; Min Operating Temperature: -40°C; Max Operating Temperature: 85°C; Package Quantity: 3000; Packaging: Tape and Reel; Min Input Voltage: 1.8V; Max Output Current: 3A; Max Input Voltage: 5.5V; Max Output Voltage: 5.5V; Quiescent Current: 50uA; Operating Supply Voltage: 5.5V; Radiation Hardening: No; REACH SVHC: No SVHC; Lead Free: Lead Free; ComponentLink1URL: http://www.ti.com/lit/ds/symlink/tps63020.pdf?src-supplier=Digi-Key; ComponentLink1Description: http://www.ti.com/lit/ds/symlink/tps63020.pdf?src-supplier=Digi-Key; ComponentLink2URL: http://www.ti.com/general/docs/lit/getliterature.tsp?genericPartNumber=TPS63021&&fileType=pdf&src-supplier=Avnet; ComponentLink2Description: http://www.ti.com/general/docs/lit/getliterature.tsp?genericPartNumber=TPS63021&&fileType=pdf&src-supplier=Avnet; Supplier Part Number 1: 296-36491-1-ND
footprint TPS63020DSJR
pins: 1 VINA, 2 GND, 3 FB, 4 VOUT, 5 VOUT, 6 L2, 7 L2, 8 L1, 9 L1, 10 VIN, 11 VIN, 12 EN, 13 PS/SYNC, 14 PG, 15 PGND

## TS861ILT
designator U?
IC COMPARATOR R-R MCRPWR SOT23-5; Manufacturer: STMicroelectronics; Voltage Gain: 240dB; Min Supply Voltage: 2.7V; Max Supply Voltage: 10V; Number of Channels: 1; Max Power Dissipation: 500mW; Nominal Supply Current: 14uA; Common Mode Rejection Ratio: 70dB; Input Offset Voltage (Vos): 15mV; Input Bias Current: 300pA; Quiescent Current: 16uA; Propagation Delay: 2us; Max Supply Current: 12uA; Output Current per Channel: 5mA; Response Time: 500ns; Power Supply Rejection Ratio (PSRR): 80dB; Supplier 1: Digi-Key; Manufacturer Part Number: TS861ILT; Stock 1: 13568; Pricing 1: 1=0.78, 10=0.682, 25=0.6412, 100=0.486, 250=0.4136, 500=0.39292, 1000=0.29986 (USD); Mount: Surface Mount; Case/Package: SOT-23; Number of Pins: 5; Min Operating Temperature: -40°C; Max Operating Temperature: 85°C; Package Quantity: 3000; Number of Elements: 1; Packaging: Tape and Reel; Max Input Current: 300pA; Power Dissipation: 500mW; Output Current: 5mA; Type: General Purpose; Radiation Hardening: No; REACH SVHC: No SVHC; Lead Free: Lead Free; ComponentLink1URL: http://www.farnell.com/datasheets/1690531.pdf?src-supplier=Element14; ComponentLink1Description: http://www.farnell.com/datasheets/1690531.pdf?src-supplier=Element14; ComponentLink2URL: http://www.st.com/content/ccc/resource/technical/document/datasheet/dd/d1/7d/d5/d5/ce/49/c5/CD00001705.pdf/files/CD00001705.pdf/jcr:content/translations/en.CD00001705.pdf?src-supplier=Digi-Key; ComponentLink2Description: http://www.st.com/content/ccc/resource/technical/document/datasheet/dd/d1/7d/d5/d5/ce/49/c5/CD00001705.pdf/files/CD00001705.pdf/jcr:content/translations/en.CD00001705.pdf?src-supplier=Digi-Key; ComponentLink3URL: http://www.mouser.com/ds/2/389/ts861-957384.pdf?src-supplier=Mouser; ComponentLink3Description: http://www.mouser.com/ds/2/389/ts861-957384.pdf?src-supplier=Mouser; ComponentLink4URL: https://www.verical.com/server-webapp/html/getDatasheet?partID=160028&src-supplier=Verical; ComponentLink4Description: https://www.verical.com/server-webapp/html/getDatasheet?partID=160028&src-supplier=Verical; ComponentLink5URL: http://www.produktinfo.conrad.com/datenblaetter/1100000-1199999/001185659-da-01-en-IC_COMPARATOR_R_R_TS861ILT_SOT_23_5_STM.pdf?src-supplier=Conrad; ComponentLink5Description: http://www.produktinfo.conrad.com/datenblaetter/1100000-1199999/001185659-da-01-en-IC_COMPARATOR_R_R_TS861ILT_SOT_23_5_STM.pdf?src-supplier=Conrad; Supplier Part Number 1: 497-6777-6-ND
footprint SOT23-5 (SOT23-5 Package)
pins: 1 OUT, 2 V- (power), 3 IN+, 4 IN-, 5 V+ (power)

## TS-1103S-C-C
designator SW?
No NO 50mA 12mm 100mΩ 200000 260gf 12V -30℃~+85℃ 12mm 5mm Black Round Button Brick nogging SPST SMD Tactile Switches ROHS; Manufacturer: XKB; ComponentLink1Description: LCSC; ComponentLink1URL: https://lcsc.com/product-detail/Tactile-Switches_XKB-Connectivity-TS-1103S-C-C_C318916.html; Manufacturer Part No: TS-1103S-C-C; Package: Custom
footprint TS-1103S-C-C
pins: 1, 2, 3, 4

## U.FL-R-SMT-1(80)
designator J?
CONN U.FL RCPT STR 50 OHM SMD; Manufacturer: Hirose; Supplier 1: Future Electronics; Manufacturer Part Number: U.FL-R-SMT-1(80); Stock 1: 1272; Pricing 1: 1=1.07, 500=0.785, 1500=0.74, 2500=0.72, 5000=0.695 (USD); Case/Package: SMD/SMT; Package Quantity: 10000; Packaging: Tape and Reel; Lead Free: Lead Free; ComponentLink1URL: https://www.hirose.com/product/en/download_file/key_name/U.FL-R-SMT-1%2880%29/category/Specification%20Sheet/doc_file_id/37638/?file_category_id=9&item_id=03310472280&is_series=&src-supplier=Digi-Key; ComponentLink1Description: https://www.hirose.com/product/en/download_file/key_name/U.FL-R-SMT-1%2880%29/category/Specification%20Sheet/doc_file_id/37638/?file_category_id=9&item_id=03310472280&is_series=&src-supplier=Digi-Key; ComponentLink2URL: http://www.mouser.com/ds/2/185/U.FL_catalog-939761.pdf?src-supplier=Mouser; ComponentLink2Description: http://www.mouser.com/ds/2/185/U.FL_catalog-939761.pdf?src-supplier=Mouser; Supplier Part Number 1: U.FL-R-SMT-1(80)-CUTT
footprint U.FL-R-SMT-1(80)
pins: 1 RF_IN, 2 GND, 3 GND

## UC15
designator U?
3G Module UC15-T LCC Package UMTS/HSDPA MODULE
footprint UTC15
part A pins: 2 AP_READY, 6 NETLIGHT, 7 VDD_EXT, 8 USIM_GND, 11 USIM_PRESENCE , 12 USIM_VDD, 13 USIM_DATA, 14 USIM_CLK, 15 USIM_RST, 17 RESET_N, 18 PWRKEY, 19 AGND, 20 SPK2P, 21 SPK1N, 22 SPK1P, 23 MIC1P, 24 MIC1N, 25 MIC2P, 26 MIC2N, 34 PCM_DOUT, 35 PCM_DIN, 36 PCM_CLK, 37 PCM_SYNC, 38 I2C_SDA, 39 I2C_SCL, 40 ADC1, 41 ADC0, 43 RF_ANT, 50 VBAT_RF, 51 VBAT_RF, 52 VBAT_BB, 53 VBAT_BB, 54 STATUS, 55 RI, 56 DCD, 57 CTS, 58 RTS, 59 DTR, 60 TXD, 61 RXD, 62 USB_DP , 63 USB_DM, 64 USB_VBUS
part B pins: 1 RESERVED, 3 RESERVED, 4 RESERVED, 5 RESERVED, 9 RESERVED, 10 RESERVED, 16 RESERVED, 27 RESERVED, 28 RESERVED, 29 RESERVED, 30 RESERVED, 31 RESERVED, 32 RESERVED, 33 RESERVED, 66 RESERVED
part C pins: 42 GND, 44 GND, 45 GND, 46 GND, 47 GND, 48 GND, 49 GND, 65 GND, 67 GND, 68 GND, 81 GND, 82 GND, 83 GND, 84 GND, 85 GND, 86 GND, 87 GND, 88 GND, 89 GND
part D pins: 90 GND, 91 GND, 92 GND, 93 GND, 94 GND, 95 GND, 96 GND, 97 GND, 98 GND, 99 GND, 100 GND, 101 GND, 102 GND, 103 GND, 104 GND, 105 GND, 106 GND, 107 GND, 108 GND

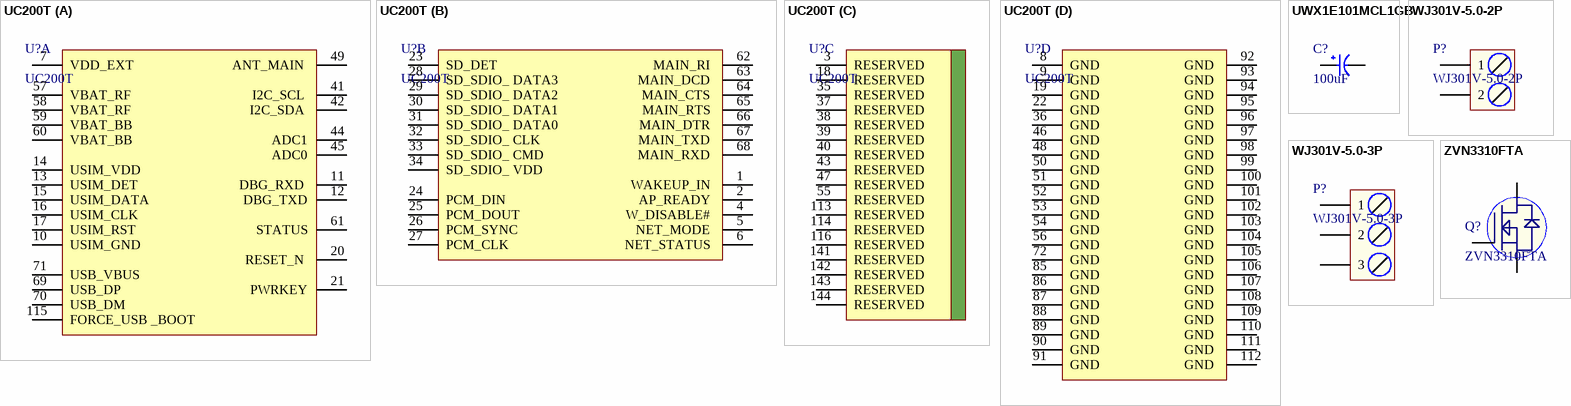
[diagram p4: symbols UC200T to ZVN3310FTA]

## UC200T
designator U?
UMTS/HSPA+ Module; Manufacturer: Quectel; Value: Custom; Manufacturer Part No: UC200T; Package: Custom
footprint UC200T
part A pins: 7 VDD_EXT, 10 USIM_GND, 11 DBG_RXD , 12 DBG_TXD, 13 USIM_DET , 14 USIM_VDD , 15 USIM_DATA , 16 USIM_CLK , 17 USIM_RST , 20 RESET_N , 21 PWRKEY, 41 I2C_SCL , 42 I2C_SDA , 44 ADC1, 45 ADC0, 49 ANT_MAIN , 57 VBAT_RF , 58 VBAT_RF , 59 VBAT_BB , 60 VBAT_BB , 61 STATUS, 69 USB_DP , 70 USB_DM , 71 USB_VBUS , 115 FORCE_USB _BOOT
part B pins: 1 WAKEUP_IN , 2 AP_READY , 4 W_DISABLE# , 5 NET_MODE , 6 NET_STATUS , 23 SD_DET , 24 PCM_DIN , 25 PCM_DOUT , 26 PCM_SYNC , 27 PCM_CLK , 28 SD_SDIO_ DATA3 , 29 SD_SDIO_ DATA2 , 30 SD_SDIO_ DATA1 , 31 SD_SDIO_ DATA0, 32 SD_SDIO_ CLK, 33 SD_SDIO_ CMD, 34 SD_SDIO_ VDD, 62 MAIN_RI , 63 MAIN_DCD , 64 MAIN_CTS , 65 MAIN_RTS , 66 MAIN_DTR , 67 MAIN_TXD , 68 MAIN_RXD 
part C pins: 3 RESERVED, 18 RESERVED, 35 RESERVED, 37 RESERVED, 38 RESERVED, 39 RESERVED, 40 RESERVED, 43 RESERVED, 47 RESERVED, 55 RESERVED, 113 RESERVED, 114 RESERVED, 116 RESERVED, 141 RESERVED, 142 RESERVED, 143 RESERVED, 144 RESERVED
part D pins: 8 GND , 9 GND , 19 GND, 22 GND , 36 GND , 46 GND , 48 GND , 50 GND , 51 GND , 52 GND , 53 GND , 54 GND , 56 GND , 72 GND , 85 GND , 86 GND , 87 GND , 88 GND , 89 GND , 90 GND , 91 GND , 92 GND , 93 GND , 94 GND , 95 GND , 96 GND , 97 GND , 98 GND , 99 GND , 100 GND , 101 GND , 102 GND , 103 GND , 104 GND , 105 GND , 106 GND , 107 GND , 108 GND , 109 GND , 110 GND , 111 GND , 112 GND 

## UWX1E101MCL1GB
designator C?, comment 100uF
CAP ALUM 100UF 20% 25V SMD; Manufacturer: Nichicon; Manufacturer Part Number: UWX1E101MCL1GB; Dielectric Material: Aluminium; Ripple Current: 110mA; Polarity: Polar; Leakage Current: 3uA; Life (Hours): 2000Hour; Dissipation Factor: 0.14%; Lead Diameter: 0.8mm; Supplier 1: Digi-Key; Stock 1: 30613; Pricing 1: 1=0.43, 10=0.301, 50=0.211, 100=0.1808, 500=0.13558 (USD); Mount: Surface Mount; Case/Package: Radial; Number of Pins: 2; Weight: 0.01lb; Min Operating Temperature: -40°C; Max Operating Temperature: 85°C; Capacitance: 100uF; Tolerance: 20%; Ripple Current (AC): 110mA; Voltage Rating: 25V; Packaging: Tape and Reel; Package Quantity: 1000; Voltage Rating (DC): 25V; Termination: SMD/SMT; Voltage: 25V; Series: WX; Construction: Cylindrical; Diameter: 8mm; Length: 5.4mm; Width: 0.25inch; Height: 5.4mm; Lead Pitch: 2.3mm; Height - Seated (Max): 0.213inch; Radiation Hardening: No; REACH SVHC: No SVHC; Lead Free: Lead Free; RoHS Compliant: Yes; ComponentLink1URL: http://nichicon-us.com/english/products/pdfs/e-uwx.pdf?src-supplier=Digi-Key; ComponentLink1Description: http://nichicon-us.com/english/products/pdfs/e-uwx.pdf?src-supplier=Digi-Key; ComponentLink2URL: http://www.nichicon.co.jp/english/products/pdfs/e-ch_ref.pdf?src-supplier=Mouser; ComponentLink2Description: http://www.nichicon.co.jp/english/products/pdfs/e-ch_ref.pdf?src-supplier=Mouser; ComponentLink3URL: http://www.nichicon.co.jp/english/products/pdfs/e-wx.pdf?src-supplier=Avnet; ComponentLink3Description: http://www.nichicon.co.jp/english/products/pdfs/e-wx.pdf?src-supplier=Avnet; ComponentLink4URL: http://uk.rs-online.com/webdocs/0fa3/0900766b80fa3a90.pdf?src-supplier=RSComponents; ComponentLink4Description: http://uk.rs-online.com/webdocs/0fa3/0900766b80fa3a90.pdf?src-supplier=RSComponents; ComponentLink5URL: http://nichicon-us.com/english/products/pdfs/e-wx.pdf?src-supplier=Future+Electronics; ComponentLink5Description: http://nichicon-us.com/english/products/pdfs/e-wx.pdf?src-supplier=Future+Electronics; ComponentLink6URL: http://www.nichicon.co.jp/english/products/pdfs/e-ch_ref.pdf?src-supplier=Avnet+Europe; ComponentLink6Description: http://www.nichicon.co.jp/english/products/pdfs/e-ch_ref.pdf?src-supplier=Avnet+Europe; ComponentLink7URL: http://www.farnell.com/datasheets/2364658.pdf?src-supplier=Element14; ComponentLink7Description: http://www.farnell.com/datasheets/2364658.pdf?src-supplier=Element14; Supplier Part Number 1: 493-2113-6-ND; Supplier 2: Digi-Key; RoHS: Yes; Category: Aluminum Electrolytic Capacitors; Stock 2: 25010; Pricing 2: 1=0.43000, 10=0.30100, 50=0.21100, 100=0.18080, 500=0.13558 (USD); ComponentLink8URL: https://datasheet.ciiva.com/11778/0900766b80fa3a90-11778418.pdf?src-supplier=RSComponents; ComponentLink8Description: https://datasheet.ciiva.com/11778/0900766b80fa3a90-11778418.pdf?src-supplier=RSComponents; ComponentLink9URL: https://datasheet.ciiva.com/17527/e-wx-17527624.pdf?src-supplier=Avnet+Europe; ComponentLink9Description: https://datasheet.ciiva.com/17527/e-wx-17527624.pdf?src-supplier=Avnet+Europe; ComponentLink10URL: https://datasheet.ciiva.com/5361/e-wx-11809-5361100.pdf?src-supplier=Mouser; ComponentLink10Description: https://datasheet.ciiva.com/5361/e-wx-11809-5361100.pdf?src-supplier=Mouser; ComponentLink11URL: https://datasheet.ciiva.com/28458/1912851-28458684.pdf?src-supplier=Element14; ComponentLink11Description: https://datasheet.ciiva.com/28458/1912851-28458684.pdf?src-supplier=Element14; ComponentLink12URL: https://datasheet.ciiva.com/96/e-wx-96650.pdf?src-supplier=Digi-Key; ComponentLink12Description: https://datasheet.ciiva.com/96/e-wx-96650.pdf?src-supplier=Digi-Key; ComponentLink13URL: https://datasheet.ciiva.com/96/e-wx-96651.pdf?src-supplier=Digi-Key; ComponentLink13Description: https://datasheet.ciiva.com/96/e-wx-96651.pdf?src-supplier=Digi-Key; ComponentLink14URL: https://datasheet.ciiva.com/96/e-wx-96652.pdf?src-supplier=Digi-Key; ComponentLink14Description: https://datasheet.ciiva.com/96/e-wx-96652.pdf?src-supplier=Digi-Key; ComponentLink15URL: https://datasheet.ciiva.com/11687/e-wx-11687148.pdf?src-supplier=Avnet; ComponentLink15Description: https://datasheet.ciiva.com/11687/e-wx-11687148.pdf?src-supplier=Avnet; ComponentLink16URL: https://datasheet.ciiva.com/16512/e-wx-16512638.pdf?src-supplier=Future+Electronics; ComponentLink16Description: https://datasheet.ciiva.com/16512/e-wx-16512638.pdf?src-supplier=Future+Electronics; Supplier Part Number 2: 493-2113-1-ND
footprint UWX1E101MCL1GB
pins: 1, 2

## WJ301V-5.0-2P
designator P?
P=5.0mm Screw terminal RoHS; Manufacturer: Ningbo Kangnex Elec; Value: Custom; Manufacturer Part No: WJ301V-5.0-2P; Package: Custom
footprint WJ301V-5.0-2P
pins: 1, 2

## WJ301V-5.0-3P
designator P?
P=5.0mm Screw terminal RoHS; Manufacturer: Ningbo Kangnex Elec; Value: Custom; Manufacturer Part No: WJ301V-5.0-3P; Package: Custom
footprint WJ301V-5.0-3P
pins: 1, 2, 3

## ZVN3310FTA
designator Q?
MOSFET N-CH 100V .1A SOT23-3; Manufacturer: Diodes Zetex; Rise Time: 5ns; Continuous Drain Current (ID): 100mA; Gate to Source Voltage (Vgs): 20V; Turn-Off Delay Time: 4ns; Turn-On Delay Time: 3ns; Rds On Max: 10R; Input Capacitance: 40pF; Nominal Vgs: 2.4V; Max Power Dissipation: 330mW; Number of Elements: 1; Element Configuration: Single; Supplier 1: Digi-Key; Manufacturer Part Number: ZVN3310FTA; Stock 1: 16974; Pricing 1: 1=0.59, 10=0.517, 25=0.4852, 100=0.3522, 250=0.33972, 500=0.29432, 1000=0.25048 (USD); Mount: Surface Mount; Case/Package: SOT-23; Number of Pins: 3; Weight: 0.000282oz; Min Operating Temperature: -55°C; Max Operating Temperature: 150°C; Package Quantity: 3000; Packaging: Tape and Reel; Dual Supply Voltage: 100V; Drain to Source Voltage (Vdss): 100V; Number of Channels: 1; Drain to Source Breakdown Voltage: 100V; Drain to Source Resistance: 10R; Fall Time: 5ns; On-State Resistance: 10R; Power Dissipation: 330mW; Termination: SMD/SMT; Threshold Voltage: 2.4V; Voltage Rating (DC): 100V; Current Rating: 100mA; Current: 100mA; Voltage: 100V; Length: 3.04mm; Height: 1.02mm; Width: 1.4mm; Radiation Hardening: No; REACH SVHC: No SVHC; Lead Free: Lead Free; ComponentLink1URL: http://www.diodes.com/_files/datasheets/ZVN3310F.pdf?src-supplier=Digi-Key; ComponentLink1Description: http://www.diodes.com/_files/datasheets/ZVN3310F.pdf?src-supplier=Digi-Key; Supplier Part Number 1: ZVN3310FCT-ND
footprint SOT23-3 (SOT23, 3-Leads, Body 2.9x1.3mm, Pitch 0.95mm, Lead Span 2.3mm - Reverse Pinning, IPC High Density)
pins: 1 G, 2 S, 3 D